# Altium footprint library FootPrintLib_9.PcbLib: 287 footprints (part 1 of 18)
Each footprint in its own frame and in the unit in brackets; x right, y up, seen from the top. Pads: shape width x height; smd on the part's side, far side on the other; paste and mask are expansions set on the pad; w line width, h text height; cw(c..) or ccw(c..) is an arc to the next point about the centre after c.
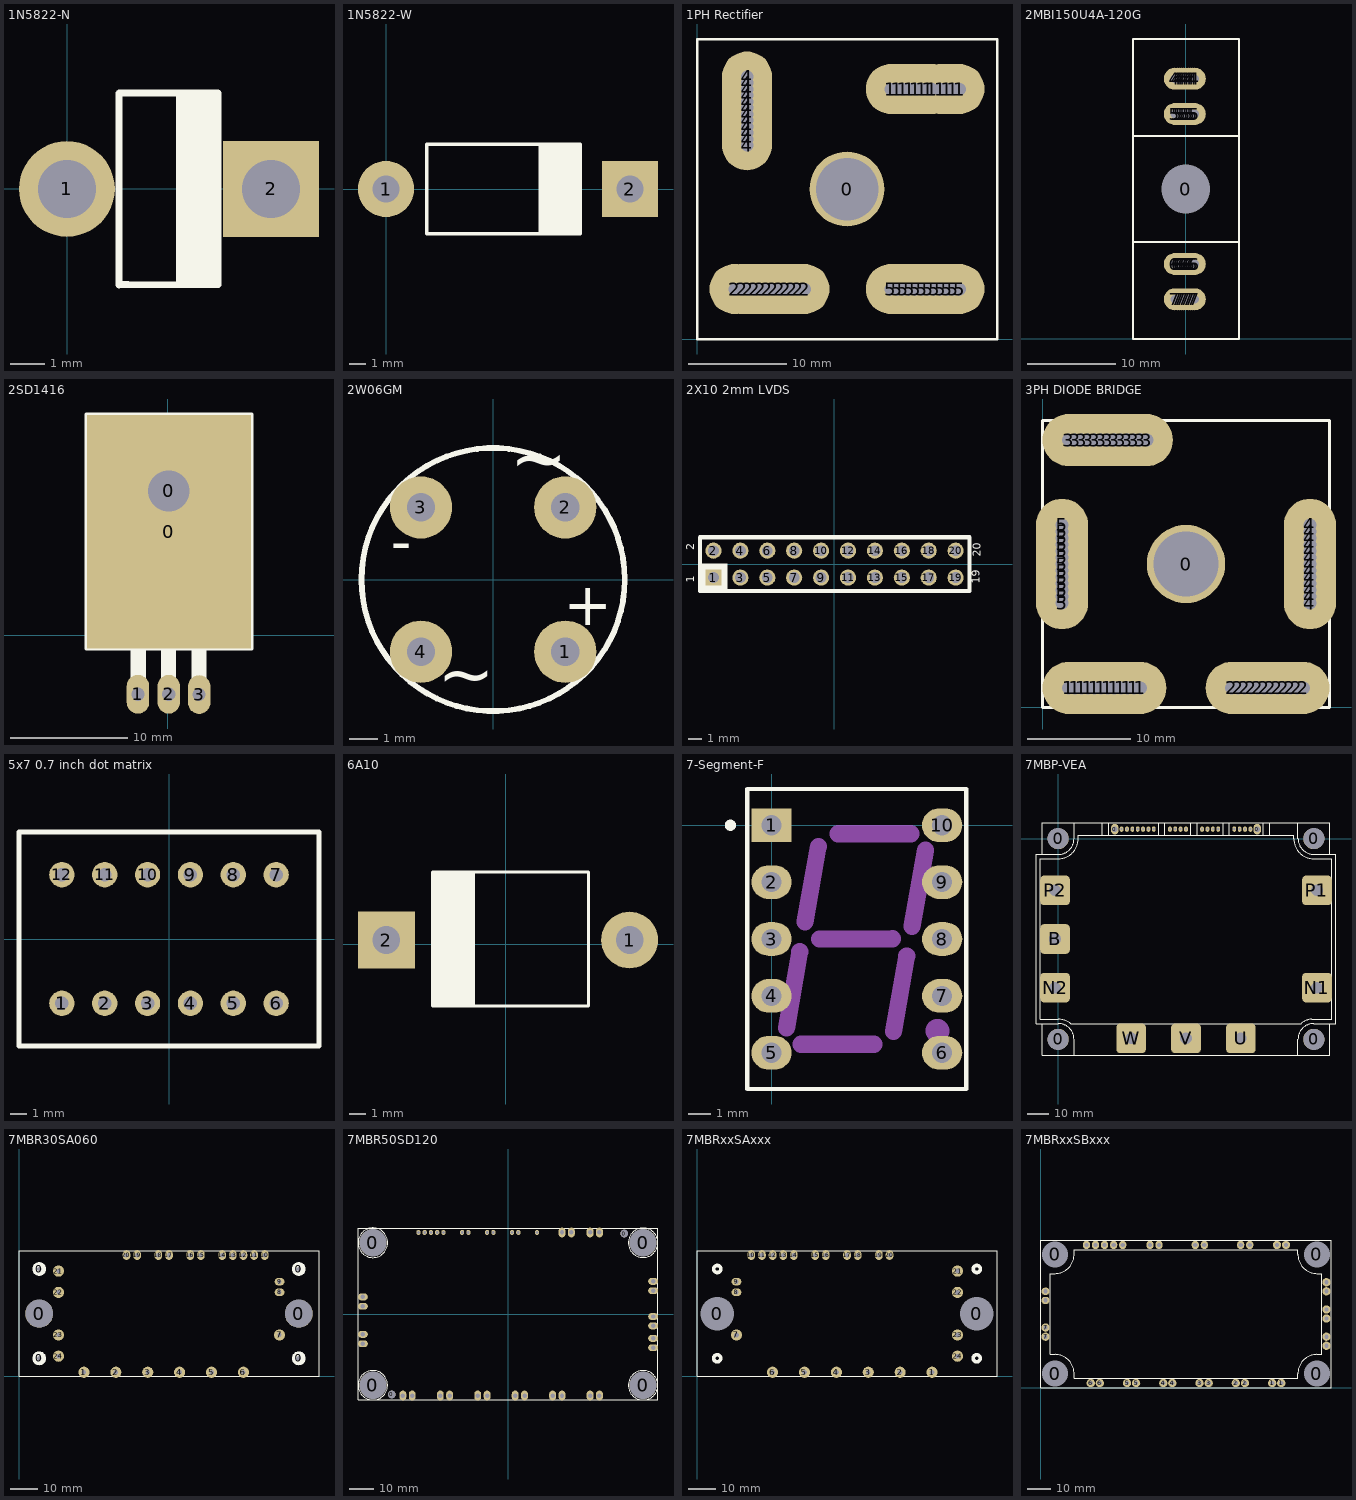
[diagram p0: the footprints below, top view; thin cyan lines are the x and y axes]

## 1N5822-N [mm]
pads (2):
  round 2.8 hole 1.7: 1(-0.012,0)
  rect 2.8x2.8 hole 1.7: 2(5.957,0)
Top Overlay:
  rectangle: 3.175,-2.8 4.509,2.8
  lines w0.2: 1.512,-2.806 1.512,2.794 1.518,2.8 4.407,2.8 ; 1.512,-2.794 1.766,-2.794 1.772,-2.8 4.407,-2.8

## 1N5822-W [mm]
pads (2):
  round 3.5 hole 1.7: 1(0,0)
  rect 3.5x3.5 hole 1.7: 2(15.24,0)
Top Overlay:
  rectangle: 9.525,-2.8 12.24,2.8
  lines w0.2: 6.312,-2.794 6.566,-2.794 6.572,-2.8 ; 6.312,2.794 6.318,2.8 ; 12.14,-2.8 2.54,-2.8 2.54,2.8 12.14,2.8

## 1PH Rectifier [mil]
pads (49):
  round 300 hole 250: 0(600,600)
  round 200 hole 50: 1(775,1000) 1(800,1000) 1(825,1000) 1(850,1000) 1(875,1000) 1(900,1000) 1(925,1000) 1(940,1000) 1(975,1000) 1(1000,1000) 1(1025,1000) 1(1050,1000) 2(150,200) 2(180,200) 2(205,200) 2(230,200) 2(255,200) 2(280,200) 2(305,200) 2(330,200) 2(355,200) 2(380,200) 2(405,200) 2(430,200) 4(200,775) 4(200,800) 4(200,825) 4(200,850) 4(200,875) 4(200,900) 4(200,925) 4(200,950) 4(200,975) 4(200,1000) 4(200,1025) 4(200,1050) 5(775,200) 5(800,200) 5(825,200) 5(850,200) 5(875,200) 5(900,200) 5(925,200) 5(950,200) 5(975,200) 5(1000,200) 5(1025,200) 5(1050,200)
Top Overlay:
  lines w10: 0,0 1200,0 1200,1200 0,1200 0,0

## 2MBI150U4A-120G [mm]
pads (41):
  round 5 hole 5.5: 0(0,17)
  round 2.5 hole 1: 4(-1.25,29.5) 4(-1,29.5) 4(-0.75,29.5) 4(-0.5,29.5) 4(-0.25,29.5) 4(0,29.5) 4(0.25,29.5) 4(0.5,29.5) 4(0.75,29.5) 4(1,29.5) 5(-1.25,25.5) 5(-1,25.5) 5(-0.75,25.5) 5(-0.5,25.5) 5(-0.25,25.5) 5(0,25.5) 5(0.25,25.5) 5(0.5,25.5) 5(0.75,25.5) 5(1,25.5) 6(-1.25,8.5) 6(-1,8.5) 6(-0.75,8.5) 6(-0.5,8.5) 6(-0.25,8.5) 6(0,8.5) 6(0.25,8.5) 6(0.5,8.5) 6(0.75,8.5) 6(1,8.5) 7(-1.25,4.5) 7(-1,4.5) 7(-0.75,4.5) 7(-0.5,4.5) 7(-0.25,4.5) 7(0,4.5) 7(0.25,4.5) 7(0.5,4.5) 7(0.75,4.5) 7(1,4.5)
Top Overlay:
  lines w0.254: -5.99,11 6.01,11 ; -5.99,23 6.01,23 ; 6,0 -5.99,0 -5.99,34 6,34 ; 6.01,0 6.01,34

## 2SD1416 [mil] "NPN Power Transistor"
pads (5):
  round 250 hole 137.8: 0(4,482.5)
  rect 550x780 smd: 0(5,346)
  oval 75x130 hole 44: 1(-99,-198) 2(4,-198) 3(106,-199)
Top Overlay:
  circle w12: c3.82,482.44 r75
  rectangle: -22,-205.57 29.18,9
  rectangle: -124,-205.57 -72.82,9
  rectangle: 80,-205.57 131.18,9
  lines w10: -273.62,-47.24 -273.62,740.16 283.46,740.16 283.46,-47.24 -273.62,-47.24 ; -195,10 202,10 202,605 136,605 136,685 -137,685 -137,605 -195,605 -195,10

## 2W06GM [mm] "Bridge Rectifiers, Lead Spacing 5.1mm"
height 5.5
pads (4):
  round 2.2 hole 1: 1(2.55,-2.55) 2(2.55,2.55) 3(-2.55,2.55) 4(-2.55,-2.55)
Top Overlay:
  circle w0.2: c0,0 r4.65
  text "-" at -2.875,1.75 h1.5
  text "+" at 4.2,-0.3 h1.5
  text "~" at 0.6,2.85 h3
  text "~" at -1.95,-4.75 h3
3D body: height 0.25, standoff -18, extent 6.875,3.925 6.875,3.925
3D body: height 0.25, standoff -18, extent 6.5,3.625 6.5,3.625

## 2X10 2mm LVDS [mm]
pads (20):
  rect 1.2x1.2 hole 0.8: 1(-8.975,-1)
  round 1.2 hole 0.8: 2(-8.975,1) 3(-6.975,-1) 4(-6.975,1) 5(-4.975,-1) 6(-4.975,1) 7(-2.975,-1) 8(-2.975,1) 9(-0.975,-1) 10(-0.975,1) 11(1.025,-1) 12(1.025,1) 13(3.025,-1) 14(3.025,1) 15(5.025,-1) 16(5.025,1) 17(7.025,-1) 18(7.025,1) 19(9.025,-1) 20(9.025,1)
Top Overlay:
  rectangle: -9.975,-2.025 -7.925,0.05
  lines w0.3: -9.975,-2 -9.975,2 10.039,2 10.039,-2 -9.975,-2
  text "20" at 11.1,0.55 h1
  text "19" at 11.05,-1.45 h1
  text "2" at -10.2,1.05 h1
  text "1" at -10.175,-1.375 h1
3D body "29936.stp": height 5, standoff -3.4, extent -10.125,-2.025 9.875,1.975

## 3PH DIODE BRIDGE [mm]
pads (64):
  round 7.62 hole 6.35: 0(13.97,13.97)
  round 5.08 hole 1.27: 1(2.54,1.905) 1(3.175,1.905) 1(3.81,1.905) 1(4.445,1.905) 1(5.08,1.905) 1(5.715,1.905) 1(6.35,1.905) 1(6.985,1.905) 1(7.62,1.905) 1(8.255,1.905) 1(8.89,1.905) 1(9.525,1.905) 2(18.415,1.905) 2(19.05,1.905) 2(19.685,1.905) 2(20.32,1.905) 2(20.955,1.905) 2(21.59,1.905) 2(22.225,1.905) 2(22.86,1.905) 2(23.495,1.905) 2(24.13,1.905) 2(24.765,1.905) 2(25.4,1.905) 3(2.54,26.035) 3(3.175,26.035) 3(3.81,26.035) 3(4.445,26.035) 3(5.08,26.035) 3(5.715,26.035) 3(6.35,26.035) 3(6.985,26.035) 3(7.62,26.035) 3(8.255,26.035) 3(8.89,26.035) 3(9.525,26.035) 3(10.16,26.035) 4(26.035,10.16) 4(26.035,10.795) 4(26.035,11.43) 4(26.035,12.065) 4(26.035,12.7) 4(26.035,13.335) 4(26.035,13.97) 4(26.035,14.605) 4(26.035,15.24) 4(26.035,15.875) 4(26.035,16.51) 4(26.035,17.145) 4(26.035,17.78) 5(1.905,10.16) 5(1.905,10.795) 5(1.905,11.43) 5(1.905,12.065) 5(1.905,12.7) 5(1.905,13.335) 5(1.905,13.97) 5(1.905,14.605) 5(1.905,15.24) 5(1.905,15.875) 5(1.905,16.51) 5(1.905,17.145) 5(1.905,17.78)
Top Overlay:
  lines w0.254: 0,0 27.94,0 27.94,27.94 0,27.94 0,0

## 5x7 0.7 inch dot matrix [mm]
pads (12):
  round 1.5 hole 0.8: 1(-6.35,-3.81) 2(-3.81,-3.81) 3(-1.27,-3.81) 4(1.27,-3.81) 5(3.81,-3.81) 6(6.35,-3.81) 7(6.35,3.81) 8(3.81,3.81) 9(1.27,3.81) 10(-1.27,3.81) 11(-3.81,3.81) 12(-6.35,3.81)
Top Overlay:
  lines w0.3: -8.89,-6.35 8.89,-6.35 8.89,6.35 -8.89,6.35 -8.89,-6.35
3D body: height 6.4, standoff -5.5, extent -8.877,-6.35 8.903,6.35

## 6A10 [mm]
pads (2):
  round 3.5 hole 1.7: 1(7.62,0.254)
  rect 3.5x3.5 hole 1.7: 2(-7.366,0.254)
Top Overlay:
  region: -1.918,4.445 -4.633,4.445 -4.633,-3.81 -1.918,-3.81
  lines w0.2: -4.52,-2.165 -4.52,-3.81 5.08,-3.81 5.08,4.445 -4.52,4.445

## 7-Segment-F [mm] "LED, 7-Segment Display, 10.16 mm, RHD; 10 Leads; Row Space 7.62 mm; Pitch 2.54 mm"
height 6.34
pads (10):
  rect 1.8x1.5 hole 0.9: 1(0,0)
  oval 1.8x1.5 hole 0.9: 2(0,-2.54) 3(0,-5.08) 4(0,-7.62) 5(0,-10.16) 6(7.62,-10.16) 7(7.62,-7.62) 8(7.62,-5.08) 9(7.62,-2.54) 10(7.62,0)
Top Overlay:
  circle w0.25: c-1.84,0 r0.125
  lines w0.2: -1.085,-11.78 8.705,-11.78 8.705,1.62 -1.085,1.62 -1.085,-11.78
Mechanical 1:
  circle w0.86: c7.41,-9.18 r0.1
  lines w0.762: 0.67,-9.06 1.26,-5.65 ; 1.31,-9.78 4.58,-9.78 ; 1.5,-4.31 2.09,-0.95 ; 2.14,-5.08 5.41,-5.07 ; 2.97,-0.38 6.23,-0.38 ; 5.45,-9.21 6.04,-5.83 ; 6.28,-4.51 6.88,-1.11

## 7MBP-VEA [mm]
pads (33):
  round 10 hole 10: 0(0,-95) 0(0,0) 0(121,-95) 0(121,0)
  oval 3.5x5 hole 2.5: 0(26.8,4.5) 0(94.2,4.5)
  oval 1.8x2.5 hole 1: 1(90.98,4.5) 2(88.44,4.5) 3(85.9,4.5) 4(83.36,4.5) 5(75.74,4.5) 6(73.2,4.5) 7(70.66,4.5) 8(68.12,4.5) 9(60.5,4.5) 10(57.96,4.5) 11(55.42,4.5) 12(52.88,4.5) 13(45.26,4.5) 14(42.72,4.5) 15(40.18,4.5) 16(37.64,4.5) 17(35.1,4.5) 18(32.56,4.5) 19(30.02,4.5)
  rrect25% 14x14 hole 5.5: B(-1.5,-47.5) N1(122.5,-70.5) N2(-1.5,-70.5) P1(122.5,-24.5) P2(-1.5,-24.5) U(86.5,-94.5) V(60.5,-94.5) W(34.5,-94.5)
Top Overlay:
  lines w0.254: -7.5,-87.5 -7.5,-102.5 128.5,-102.5 128.5,-87.5 ; -7.5,-7.5 -7.5,7.5 128.5,7.5 128.5,-7.5 ; 5.935,-87.582 ccw(c0,-95) 0,-85.5 -8.5,-85.5 -8.5,-9.5 0,-9.5 ccw(c0,0) 9.5,0 9.5,1.5 111.5,1.5 111.5,0 ccw(c121,0) 121,-9.5 129.5,-9.5 129.5,-85.5 120.068,-85.5 ccw(c120.068,-92.707) 115.041,-87.543 ; 6,-87.5 115,-87.5 ; 7.5,-102.5 7.5,-95 ccw(c0,-95) 0,-87.5 -10.5,-87.5 -10.5,-7.5 0,-7.5 ccw(c0,0) 7.5,0 7.5,7.5 ; 20.852,1.5 20.852,7.5 ; 23.852,1.5 23.852,7.5 ; 47.552,1.5 47.552,7.5 ; 50.552,1.5 50.552,7.5 ; 62.852,1.5 62.852,7.5 ; 65.852,1.5 65.852,7.5 ; 78.052,1.5 78.052,7.5 ; 81.052,1.5 81.052,7.5 ; 97.148,1.5 97.148,7.5 ; 100.148,1.5 100.148,7.5 ; 113.5,-102.5 113.5,-95 cw(c121,-95) 121,-87.5 131.5,-87.5 131.5,-7.5 121.162,-7.5 cw(c121.162,0.162) 113.5,0.162 ; 113.5,0 113.5,7.5

## 7MBR30SA060 [mm]
pads (30):
  round 5 on Top Overlay hole 1.524: 0(7.25,6.5) 0(7.25,38.5) 0(100.25,6.5) 0(100.25,38.5)
  round 10 hole 10: 0(7.25,22.5) 0(100.25,22.5)
  round 4 hole 1.6: 1(23.27,1.5) 2(34.7,1.5) 3(46.13,1.5) 4(57.56,1.5) 5(68.99,1.5) 6(80.42,1.5) 7(93.35,14.875) 21(14.15,37.75) 22(14.15,30.125) 23(14.15,14.85) 24(14.15,7.25)
  oval 3.5x2.75 hole 1.6: 8(93.35,30.15) 9(93.35,33.96)
  oval 2.75x3.5 hole 1.6: 10(88.04,43.5) 11(84.23,43.5) 12(80.42,43.5) 13(76.61,43.5) 14(72.8,43.5) 15(65.18,43.5) 16(61.37,43.5) 17(53.75,43.5) 18(49.94,43.5) 19(42.32,43.5) 20(38.51,43.5)
Top Overlay:
  lines w0.305: 0,0 107.5,0 107.5,45 0,45 0,0

## 7MBR50SD120 [mm]
pads (44):
  round 11 hole 11: 0(-55.005,-29) 0(-55.005,29) 0(54.995,-29) 0(54.995,29)
  round 3.1 hole 3.1: 0(-47.25,-32.75) 0(47.25,32.75)
  oval 2.8x4 hole 1.8: 1(33.405,-33.191) 1(37.215,-33.191) 2(18.165,-33.191) 2(21.975,-33.191) 3(2.925,-33.191) 3(6.735,-33.191) 4(-12.315,-33.191) 4(-8.505,-33.191) 5(-27.555,-33.191) 5(-23.745,-33.191) 6(-42.795,-33.191) 6(-38.985,-33.191) 21(33.405,33.191) 21(37.215,33.191) 26(21.975,33.191) 26(25.785,33.191)
  oval 4x2.8 hole 1.8: 7(-59.051,-12.109) 7(-59.051,-8.299) 8(-59.051,3.131) 9(-59.051,6.941) 22(59.05,9.48) 22(59.05,13.29) 23(59.05,-4.83) 23(59.05,-1.02) 24(59.05,-13.72) 24(59.05,-9.91)
  oval 1.7x2 hole 1.1: 10(-36.445,33.191) 11(-33.905,33.191) 12(-31.365,33.191) 13(-28.825,33.191) 14(-26.285,33.191) 15(-18.665,33.191) 16(-16.125,33.191) 17(-8.505,33.191) 18(-5.965,33.191) 19(1.655,33.191) 20(4.195,33.191) 25(11.815,33.191)
Top Overlay:
  circle w0.254: c55,-29 r6
  circle w0.254: c55,29 r6
  circle w0.254: c-55,29 r6.021
  circle w0.254: c-55,-29 r6
  lines w0.305: -61.005,-35 -61.005,35 60.995,35 60.995,-35 -61.005,-35
Bottom Overlay:
  circle w0.254: c-55,-29 r6
  circle w0.254: c-55,29 r6.021
  circle w0.254: c55,29 r6
  circle w0.254: c55,-29 r6
  lines w0.305: -61.005,-35 60.995,-35 60.995,35 -61.005,35 -61.005,-35

## 7MBRxxSAxxx [mm]
pads (26):
  round 10 hole 12: 0(7.25,22.5) 0(100.25,22.5)
  round 4 hole 1.75: 1(84.23,1.5) 2(72.8,1.5) 3(61.37,1.5) 4(49.94,1.5) 5(38.51,1.5) 6(27.08,1.5) 7(14.15,14.875) 21(93.35,37.75) 22(93.35,30.125) 23(93.35,14.85) 24(93.35,7.25)
  oval 3.5x2.75 hole 1.6: 8(14.15,30.15) 9(14.15,33.96)
  oval 2.75x3.5 hole 1.6: 10(19.46,43.5) 11(23.27,43.5) 12(27.08,43.5) 13(30.89,43.5) 14(34.7,43.5) 15(42.32,43.5) 16(46.13,43.5) 17(53.75,43.5) 18(57.56,43.5) 19(65.18,43.5) 20(68.99,43.5)
Top Overlay:
  circle w1.27: c7.25,38.5 r1.27
  circle w1.27: c7.25,6.5 r1.27
  circle w1.27: c100.25,6.5 r1.27
  circle w1.27: c100.25,38.5 r1.27
  lines w0.305: 0,0 0,45 107.5,45 107.5,0 0,0
Bottom Overlay:
  lines w0.305: 0,0 0,45 107.5,45 107.5,0 0,0

## 7MBRxxSBxxx [mm]
pads (39):
  round 10 hole 11: 0(6,6) 0(6,56) 0(116,6) 0(116,56)
  round 3.5 hole 1.8: 1(97.19,2) 1(101,2) 2(81.95,2) 2(85.76,2) 3(66.71,2) 3(70.52,2) 4(51.47,2) 4(55.28,2) 5(36.23,2) 5(40.04,2) 6(20.99,2) 6(24.8,2) 7(2,21.475) 7(2,25.285) 21(99.19,60) 21(103,60) 22(120,40.525) 22(120,44.335) 23(120,29.095) 23(120,32.905) 24(120,17.665) 24(120,21.475)
  oval 3.5x3.048 hole 1.8: 8(2,36.715) 9(2,40.525)
  oval 3.048x3.5 hole 1.8: 10(19.18,60) 11(22.99,60) 12(26.8,60) 13(30.61,60) 14(34.42,60) 15(45.85,60) 16(49.66,60) 17(64.9,60) 18(68.71,60) 19(83.95,60) 20(87.76,60)
Top Overlay:
  lines w0.305: 0,0 122,0 122,62 0,62 0,0 ; 4,14 4,48 6,48 ccw(c6,56) 14,56 14,58 108,58 108,56 ccw(c116,56) 116,48 118,48 118,14 116,14 ccw(c116,6) 108,6 108,4 14,4 14,6 ccw(c6,6) 6,14 4,14
Bottom Overlay:
  lines w0.305: 0,0 122,0 122,62 0,62 0,0